# Altium schematic symbol library AD5422BREZ.SchLib: 1 symbol
Pins are listed as number, name and electrical type; pins without a type are passive.

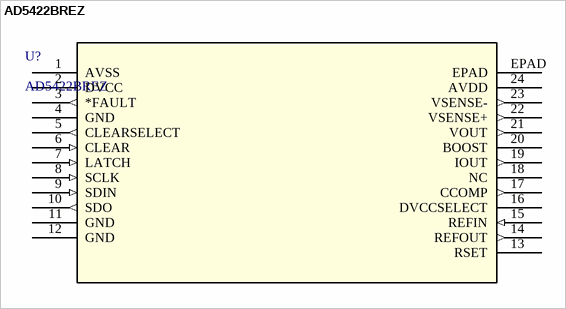
[diagram p0: symbol AD5422BREZ]

## AD5422BREZ
designator U?
Single Channel, 16-Bit, Current Source & Voltage Output DAC, HART Connectivity; Manufacturer_Name: Analog Devices Inc; Copyright: Copyright (C) 2026 Ultra Librarian. All rights reserved.; Manufacturer_Part_Number: AD5422BREZ; Datasheet: https://www.analog.com/media/en/technical-documentation/data-sheets/AD5412_5422.pdf; RefDes: RefDes; Type: Type
footprint RE_24_ADI
pins: 1 AVSS (power), 2 DVCC (power), 3 *FAULT (out), 4 GND (power), 5 CLEARSELECT (out), 6 CLEAR (in), 7 LATCH (in), 8 SCLK (in), 9 SDIN (in), 10 SDO (out), 11 GND (power), 12 GND (power), 13 RSET, 14 REFOUT (out), 15 REFIN (in), 16 DVCCSELECT (power), 17 CCOMP (out), 18 NC, 19 IOUT (out), 20 BOOST, 21 VOUT (out), 22 VSENSE+ (out), 23 VSENSE- (out), 24 AVDD (power), EPAD